# Altium footprint library Sensor.PcbLib: 15 footprints
Each footprint in its own frame and in the unit in brackets; x right, y up, seen from the top. Pads: shape width x height; smd on the part's side, far side on the other; paste and mask are expansions set on the pad; w line width, h text height; cw(c..) or ccw(c..) is an arc to the next point about the centre after c.
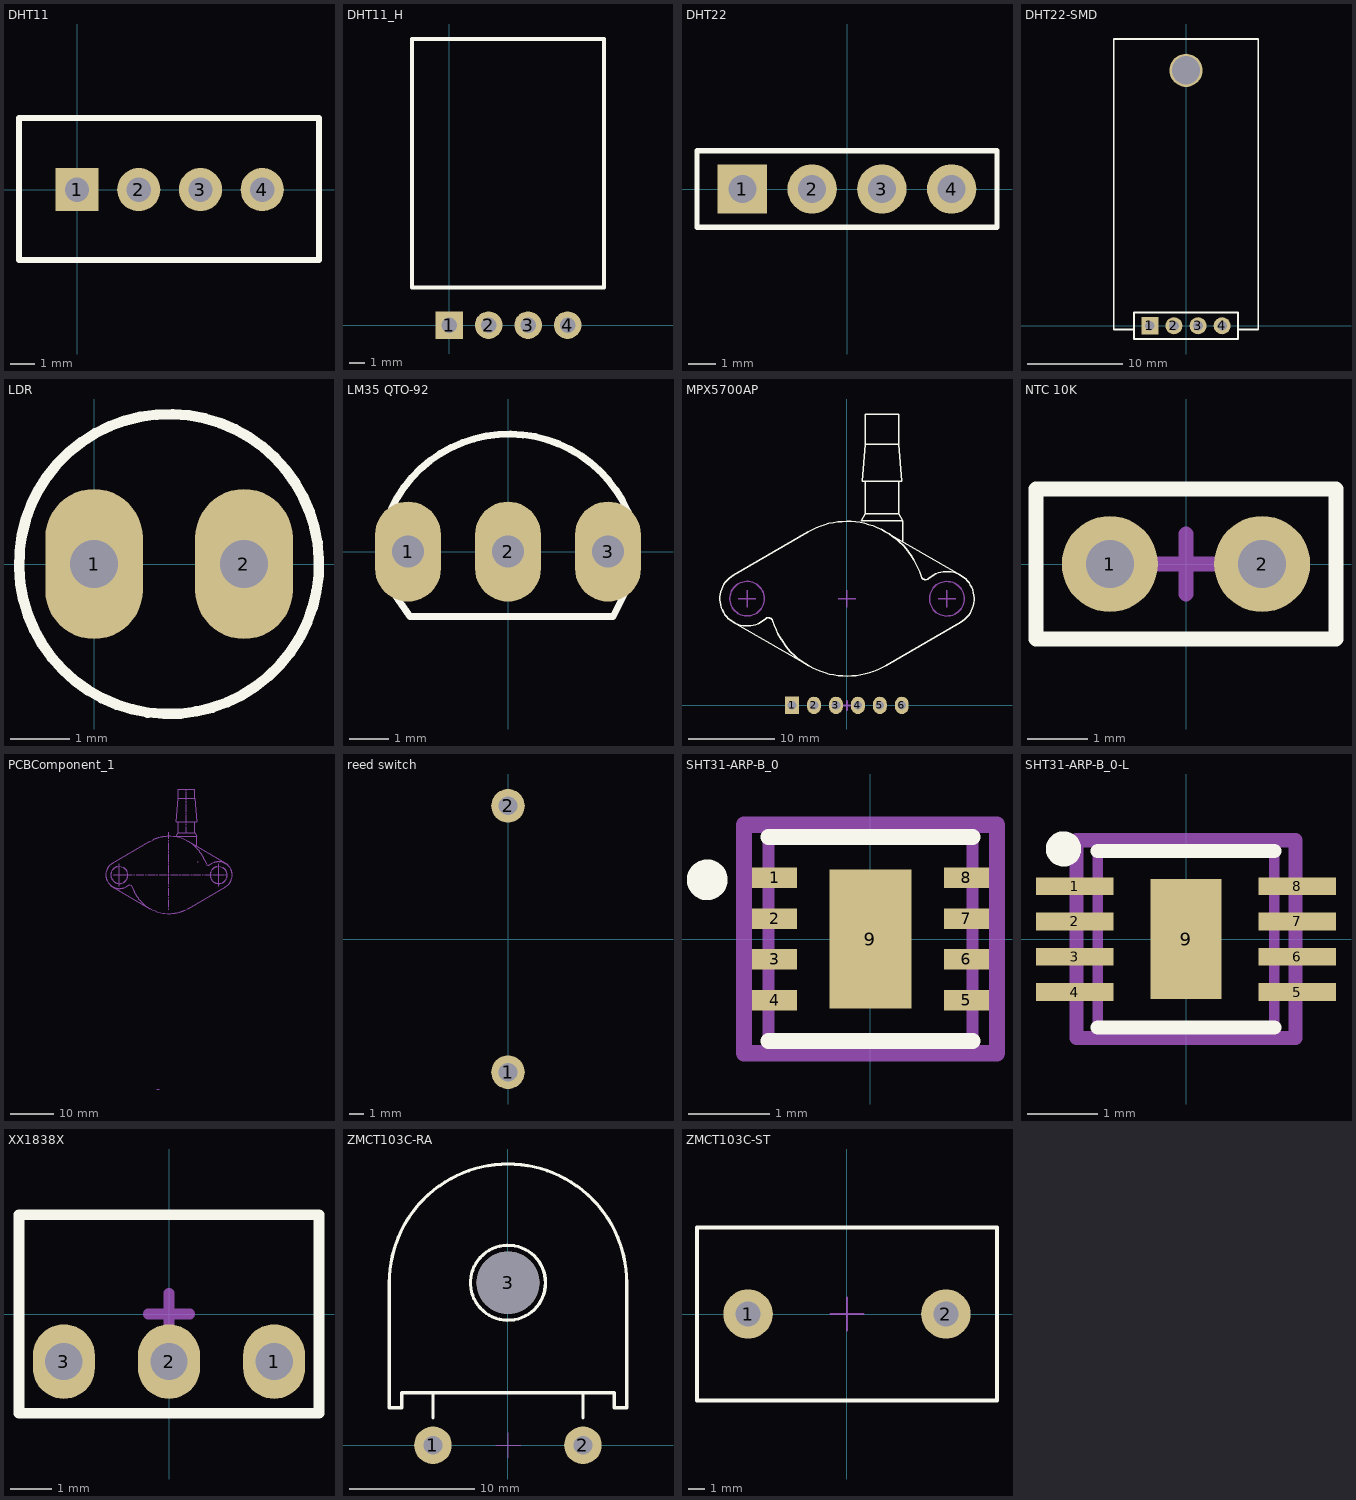
[diagram p0: the footprints below, top view; thin cyan lines are the x and y axes]

## DHT11 [mil]
pads (4):
  rect 70x70 hole 39.37 unplated: 1(0,0)
  round 70 hole 39.37 unplated: 2(100,0) 3(200,0)
  round 70 hole 39.37 unplated mask+4: 4(300,0)
Top Overlay:
  lines w10: -94,-114 392,-114 392,116 -94,116 -94,-114
Top Designator:
  text ".Designator" at 2.92,-12.54 h60
3D body "User Library-DHT11.STEP": height 610.73, standoff -314.47, extent -87.22,-107.01 385.22,109.53

## DHT11_H [mil]
pads (4):
  rect 70x70 hole 39.37 unplated: 1(0,0)
  round 70 hole 39.37 unplated: 2(100,0) 3(200,0)
  round 70 hole 39.37 unplated mask+4: 4(300,0)
Top Overlay:
  lines w10: -94,95 -94,725 392,725 392,95 -94,95
Top Designator:
  text ".Designator" at 2.92,331.96 h60
3D body "User Library-DHT11-right.STEP": height 217.04, standoff -101.86, extent -86.22,-15 386.22,713.34

## DHT22 [mm]
height 8.5
pads (4):
  rect 1.8x1.8 hole 1.02: 1(-3.81,0)
  round 1.8 hole 1.02: 2(-1.27,0) 3(1.27,0) 4(3.81,0)
Top Overlay:
  lines w0.2: -5.461,-1.397 -5.461,1.397 5.461,1.397 5.461,-1.397 -5.461,-1.397
Top Designator:
  text ".Designator" at -3.837,-2.111 h1.52
3D body "DHT22.SLDPRT": height 35.57, standoff 2.62, extent -7.862,-5.842 7.608,2.308
3D body "61300411821.stp": height 8.51, standoff -3.09, extent -5.33,-1.25 5.33,1.25

## DHT22-SMD [mm]
height 8.5
pads (5):
  rect 1.8x1.8 hole 1.02: 1(-3.81,0)
  round 1.8 hole 1.02: 2(-1.27,0) 3(1.27,0) 4(3.81,0)
  round 3.5 hole 3: ""(0,26.924)
Top Overlay:
  lines w0.2: -5.461,-0.381 -7.62,-0.381 -7.62,30.226 7.62,30.226 7.62,-0.381 5.461,-0.381 ; -5.461,-1.397 5.461,-1.397 5.461,1.397 -5.461,1.397 -5.461,-1.397
Top Designator:
  text ".Designator" at -3.71,14.071 h1.52
3D body "DHT22.stp": height 1.5, standoff -8.23, extent -7.55,-0.253 7.55,30.096

## LDR [mil] "LDR cds"
height 300
pads (2):
  oval 65x100 hole 32: 1(0,0) 2(100,0)
Top Overlay:
  lines w7: 136.62,-49.97 cw(c50,0) 137.42,-48.56
Top Designator:
  text ".Designator" at -96.07,-13.54 h60
3D body "User Library-photocell_v8.STEP": height 397.64, standoff -82.68, extent -49.21,-84.64 151.58,84.65

## LM35 QTO-92 [mil] "TO-92"
height 200
pads (3):
  oval 66x100 hole 32: 1(-100,0) 2(0,0) 3(100,0)
Top Overlay:
  lines w7: -116.52,43.21 cw(c0.97,-12.43) 119.94,39.97 ; -115.34,-40.24 -98,-65 105,-65 118,-39
Top Designator:
  text ".Designator" at -146.08,12.75 h60
3D body "Lm35.STEP": height 367.72, standoff -45.22, extent -99.82,-55 99.81,104.84

## MPX5700AP [mm]
pads (6):
  rect 1.6x2 hole 1: 1(-6.35,0)
  oval 1.6x2 hole 1: 2(-3.81,0) 3(-1.27,0) 4(1.27,0) 5(3.81,0) 6(6.35,0)
Top Overlay:
  lines w0.15: -13.144,9.593 -3.925,4.28 ; -9.479,9.967 cw(c-9.088,9.594) -8.566,9.732 ; -9.476,9.964 cw(c-11.549,12.336) -13.132,15.059 -4.485,20.077 cw(c0.006,12.336) 8.57,14.937 ; -8.557,9.735 ccw(c0.006,12.336) 4.498,4.595 ; 2.146,25.921 2.146,22.18 ; 3.938,20.392 13.157,15.079 ; 4.499,4.595 13.147,9.613 ; 5.978,25.913 5.978,22.18 ; 6.462,18.993 6.462,21.333 ; 8.582,14.936 ccw(c9.104,15.075) 9.495,14.702 ; 9.492,14.704 cw(c11.564,12.333) 13.148,9.61 ; 2.145,22.18 1.661,21.333 6.462,21.333 ; 2.146,22.18 5.978,22.18 ; 2.145,30.208 2.145,33.706 ; 2.145,30.208 2.145,33.706 ; 2.145,30.208 5.978,30.208 ; 2.145,30.208 1.766,25.921 6.357,25.912 5.978,30.208 ; 2.145,33.705 5.978,33.706 ; 5.978,22.18 6.462,21.333 ; 5.978,30.208 5.978,33.705 ; 5.978,33.705 5.978,33.706
Top Designator:
  text ".Designator" at -3.71,-0.344 h1.52
Mechanical 15:
  circle w0.15: c-11.55,12.34 r2
  circle w0.15: c11.564,12.333 r2
  lines w0.15: -12.549,12.336 -10.549,12.336 ; -11.549,11.336 -11.549,13.336 ; -0.994,12.336 1.006,12.336 ; 0.006,11.336 0.006,13.336 ; 10.564,12.333 12.564,12.333 ; 11.564,11.333 11.564,13.333
  lines w0.254: -0.5,0 0.5,0 ; 0,-0.5 0,0.5
3D body "Part6.STEP": height 7.92, standoff -2.61, extent -14.689,-0.16 14.689,33.69

## NTC 10K [mm]
pads (2):
  round 1.6 hole 0.8: 1(-1.27,0) 2(1.27,0)
Top Overlay:
  lines w0.254: -2.5,-1.25 -2.5,1.25 2.5,1.25 2.5,-1.25 -2.5,-1.25
Top Designator:
  text ".Designator" at -3.71,-0.344 h1.52
Mechanical 15:
  lines w0.254: -0.5,0 0.5,0 ; 0,-0.5 0,0.5

## PCBComponent_1 [mm]
Mechanical 15:
  drawing of 803 lines, arcs and shapes, not listed

## reed switch [mil]
pads (2):
  round 90 hole 50: 1(0,-356.53) 2(0,356.53)
Top Designator:
  text ".Designator" at -146.08,-13.54 h60
3D body "Assembly reed.STEP": height 104.33, standoff -157.48, extent -45.27,-366.53 45.28,363.78

## SHT31-ARP-B_0 [mm]
pads (9):
  rect 0.55x0.25 smd: 1(-1.175,0.75) 2(-1.175,0.25) 3(-1.175,-0.25) 4(-1.175,-0.75) 5(1.175,-0.75) 6(1.175,-0.25) 7(1.175,0.25) 8(1.175,0.75)
  rect 1x1.7 smd paste-1000 mask+0: 9(0,0)
Top Overlay:
  circle w0.25: c-2.001,0.725 r0.125
  lines w0.2: -1.25,-1.25 1.25,-1.25 ; -1.25,1.25 1.25,1.25
Top Designator:
  text ".Designator" at -4.011,-0.344 h1.52
Mechanical 12:
  lines w0.15: -1.25,-1.25 -1.25,1.25 1.25,1.25 1.25,-1.25 -1.25,-1.25
Mechanical 15:
  lines w0.1: -0.42,0 0.42,0 ; 0,-0.42 0,0.42
  lines w0.2: -1.55,-1.4 -1.55,1.4 ; -1.55,-1.4 -1.55,1.4 ; -1.55,-1.4 1.55,-1.4 ; -1.55,-1.4 1.55,-1.4 ; -1.55,1.4 1.55,1.4 ; -1.55,1.4 1.55,1.4 ; 1.55,-1.4 1.55,1.4 ; 1.55,-1.4 1.55,1.4
3D body "User Library-sht3x-1.step": height 0.91, standoff 0.01, extent -1.25,-1.25 1.25,1.25

## SHT31-ARP-B_0-L [mm]
pads (9):
  rect 1.1x0.25 smd: 1(-1.575,0.75) 2(-1.575,0.25) 3(-1.575,-0.25) 4(-1.575,-0.75) 5(1.575,-0.75) 6(1.575,-0.25) 7(1.575,0.25) 8(1.575,0.75)
  rect 1x1.7 smd paste-1000 mask+0: 9(0,0)
Top Overlay:
  circle w0.25: c-1.734,1.278 r0.125
  lines w0.2: -1.25,-1.25 1.25,-1.25 ; -1.25,1.25 1.25,1.25
Top Designator:
  text ".Designator" at -3.71,-0.33 h1.52
Mechanical 12:
  lines w0.15: -1.25,-1.25 1.25,-1.25 1.25,1.25 -1.25,1.25 -1.25,-1.25
Mechanical 15:
  lines w0.1: -0.42,0 0.42,0 ; 0,-0.42 0,0.42
  lines w0.2: -1.55,-1.4 1.55,-1.4 ; -1.55,-1.4 1.55,-1.4 ; -1.55,-1.4 -1.55,1.4 ; -1.55,-1.4 -1.55,1.4 ; -1.55,1.4 1.55,1.4 ; -1.55,1.4 1.55,1.4 ; 1.55,-1.4 1.55,1.4 ; 1.55,-1.4 1.55,1.4
3D body "User Library-sht3x-1.step": height 0.91, standoff 0.01, extent -1.25,-1.25 1.25,1.25

## XX1838X [mm] "38KHz IR"
pads (3):
  oval 1.5x1.8 hole 0.9: 1(2.54,-1.15) 2(0,-1.15) 3(-2.54,-1.15)
Top Overlay:
  lines w0.254: -3.623,-2.4 -3.623,2.4 3.623,2.4 3.623,-2.4 -3.623,-2.4
Top Designator:
  text ".Designator" at -3.71,-0.344 h1.52
Mechanical 15:
  lines w0.254: -0.5,0 0.5,0 ; 0,-0.5 0,0.5
  text "vcc" at -2.221,0.791 h1
  text "gnd" at 0.414,0.711 h1
  text "out" at 2.859,0.912 h1
3D body "User Library-vs1838b.step": height 10.8, standoff -18.79, extent -3.623,-2.4 3.623,2.4

## ZMCT103C-RA [mm]
pads (3):
  round 3 hole 1.5: 1(-6,0) 2(6,0)
  round 5 hole 5: 3(0,13)
Top Overlay:
  circle w0.254: c0,13 r3
  lines w0.254: -6,2.2 -6,4.2 ; 6,2.2 6,4.2 ; -9.5,3 -8.5,3 -8.5,4.2 8.5,4.2 8.5,3 9.5,3 9.5,13 ccw(c0,13) -9.5,13 -9.5,3
Top Designator:
  text ".Designator" at -3.71,10.169 h1.52
Mechanical 15:
  lines w0.1: -1,0 1,0 ; 0,-1 0,1
3D body "ZMCT103C (1).stp": height 10.02, standoff 0.01, extent -9,-1 9,21.905

## ZMCT103C-ST [mm]
pads (2):
  round 3 hole 1.5: 1(-6,0) 2(6,0)
Top Overlay:
  lines w0.254: -9.1,-5.25 -9.1,5.25 9.1,5.25 9.1,-5.25 -9.1,-5.25
Top Designator:
  text ".Designator" at -3.71,-0.344 h1.52
Mechanical 15:
  lines w0.1: -1,0 1,0 ; 0,-1 0,1
3D body "ZMCT103C (1).stp": height 19.01, standoff -3.89, extent -9,-5 9,5